# Altium footprint library WR-PHD_Socket Header_2.54mm.PcbLib: 187 footprints (part 12 of 12)
Each footprint in its own frame and in the unit in brackets; x right, y up, seen from the top. Pads: shape width x height; smd on the part's side, far side on the other; paste and mask are expansions set on the pad; w line width, h text height; cw(c..) or ccw(c..) is an arc to the next point about the centre after c.
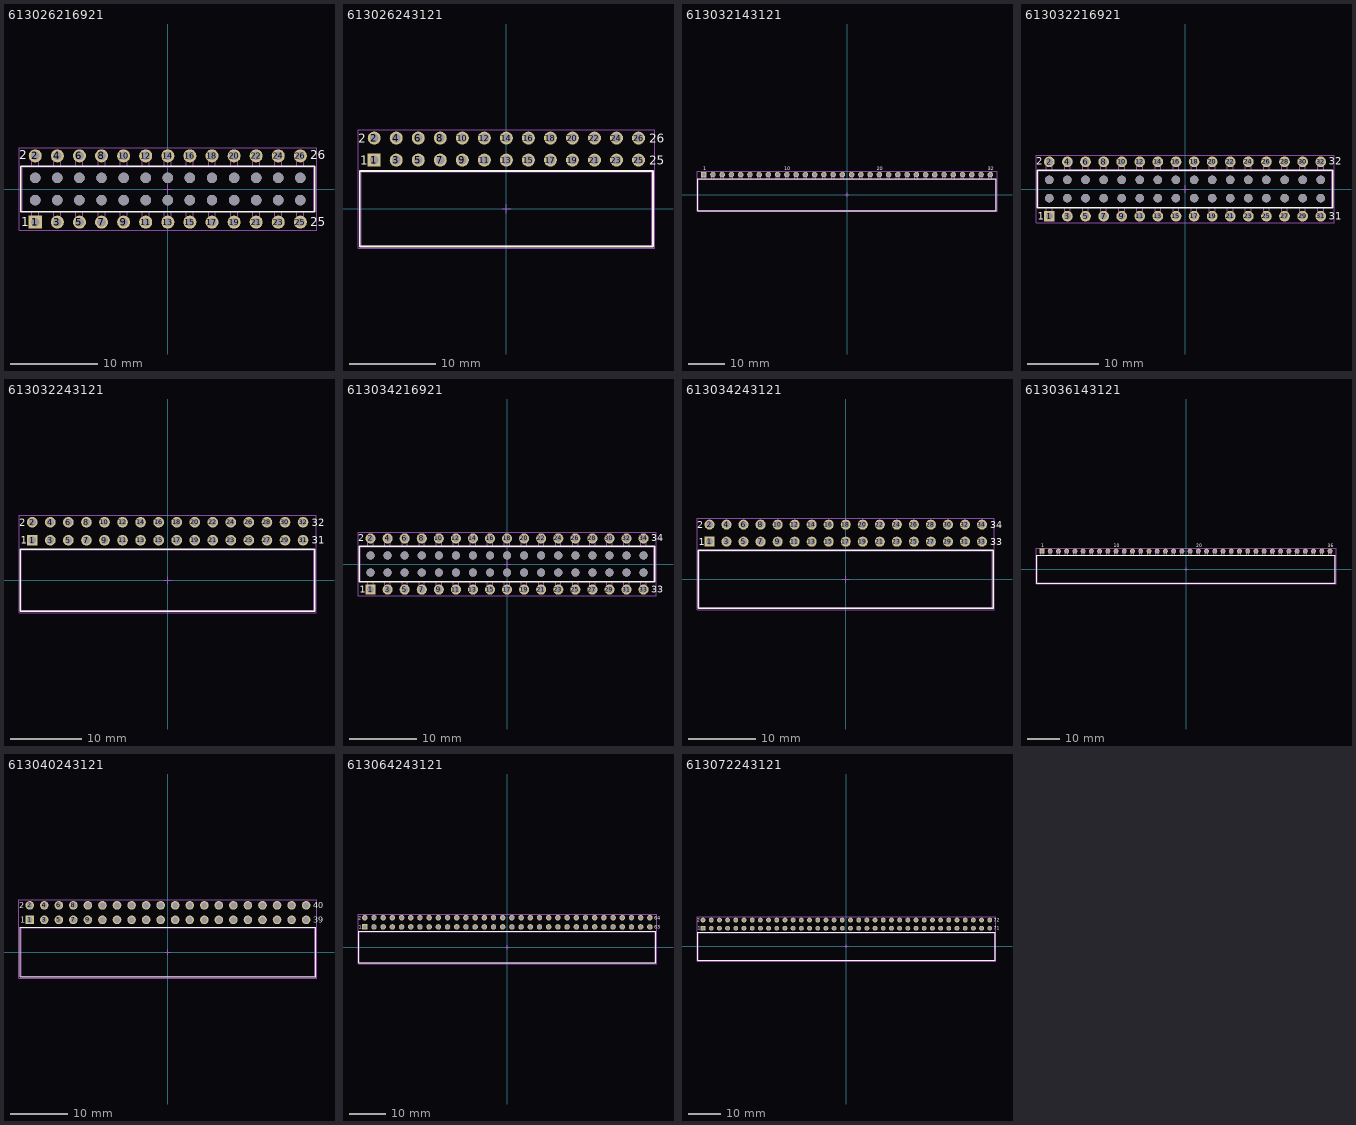
[diagram p11: the footprints below, top view; thin cyan lines are the x and y axes]

## 613026216921 [mm] "Socket Header, Pitch 2.54 mm, THT, Vertical, dual row, 26p"
height 5
pads (52):
  rect 1.5x1.5 hole 1: 1(-15.24,-3.81)
  round 1.5 hole 1: 2(-15.24,3.81) 3(-12.7,-3.81) 4(-12.7,3.81) 5(-10.16,-3.81) 6(-10.16,3.81) 7(-7.62,-3.81) 8(-7.62,3.81) 9(-5.08,-3.81) 10(-5.08,3.81) 11(-2.54,-3.81) 12(-2.54,3.81) 13(0,-3.81) 14(0,3.81) 15(2.54,-3.81) 16(2.54,3.81) 17(5.08,-3.81) 18(5.08,3.81) 19(7.62,-3.81) 20(7.62,3.81) 21(10.16,-3.81) 22(10.16,3.81) 23(12.7,-3.81) 24(12.7,3.81) 25(15.24,-3.81) 26(15.24,3.81)
  round 1.2 hole 1.2 unplated: MH1(-15.24,-1.27) MH2(-15.24,1.27) MH3(-12.7,-1.27) MH4(-12.7,1.27) MH5(-10.16,-1.27) MH6(-10.16,1.27) MH7(-7.62,-1.27) MH8(-7.62,1.27) MH9(-5.08,-1.27) MH10(-5.08,1.27) MH11(-2.54,-1.27) MH12(-2.54,1.27) MH13(0,-1.27) MH14(0,1.27) MH15(2.54,-1.27) MH16(2.54,1.27) MH17(5.08,-1.27) MH18(5.08,1.27) MH19(7.62,-1.27) MH20(7.62,1.27) MH21(10.16,-1.27) MH22(10.16,1.27) MH23(12.7,-1.27) MH24(12.7,1.27) MH25(15.24,-1.27) MH26(15.24,1.27)
Top Overlay:
  lines w0.2: -16.91,-2.615 16.91,-2.615 16.91,2.615 -16.91,2.615 -16.91,-2.615
  text "1" at -16.87,-4.3 h1.02
  text "2" at -17.07,3.4 h1.02
  text "25" at 16.37,-4.3 h1.02
  text "26" at 16.37,3.4 h1.02
Mechanical 13:
  lines w0.1: -15.64,-2.54 -15.64,-3.935 -14.84,-3.935 -14.84,-2.54 ; -15.64,2.54 -15.64,3.935 -14.84,3.935 -14.84,2.54 ; -13.1,-2.54 -13.1,-3.935 -12.3,-3.935 -12.3,-2.54 ; -13.1,2.54 -13.1,3.935 -12.3,3.935 -12.3,2.54 ; -10.56,-2.54 -10.56,-3.935 -9.76,-3.935 -9.76,-2.54 ; -10.56,2.54 -10.56,3.935 -9.76,3.935 -9.76,2.54 ; -8.02,-2.54 -8.02,-3.935 -7.22,-3.935 -7.22,-2.54 ; -8.02,2.54 -8.02,3.935 -7.22,3.935 -7.22,2.54 ; -5.48,-2.54 -5.48,-3.935 -4.68,-3.935 -4.68,-2.54 ; -5.48,2.54 -5.48,3.935 -4.68,3.935 -4.68,2.54 ; -2.94,-2.54 -2.94,-3.935 -2.14,-3.935 -2.14,-2.54 ; -2.94,2.54 -2.94,3.935 -2.14,3.935 -2.14,2.54 ; -0.4,-2.54 -0.4,-3.935 0.4,-3.935 0.4,-2.54 ; -0.4,2.54 -0.4,3.935 0.4,3.935 0.4,2.54 ; 2.14,-2.54 2.14,-3.935 2.94,-3.935 2.94,-2.54 ; 2.14,2.54 2.14,3.935 2.94,3.935 2.94,2.54 ; 4.68,-2.54 4.68,-3.935 5.48,-3.935 5.48,-2.54 ; 4.68,2.54 4.68,3.935 5.48,3.935 5.48,2.54 ; 7.22,-2.54 7.22,-3.935 8.02,-3.935 8.02,-2.54 ; 7.22,2.54 7.22,3.935 8.02,3.935 8.02,2.54 ; 9.76,-2.54 9.76,-3.935 10.56,-3.935 10.56,-2.54 ; 9.76,2.54 9.76,3.935 10.56,3.935 10.56,2.54 ; 12.3,-2.54 12.3,-3.935 13.1,-3.935 13.1,-2.54 ; 12.3,2.54 12.3,3.935 13.1,3.935 13.1,2.54 ; 14.84,-2.54 14.84,-3.935 15.64,-3.935 15.64,-2.54 ; 14.84,2.54 14.84,3.935 15.64,3.935 15.64,2.54 ; -16.76,-2.54 -16.76,2.54 16.76,2.54 16.76,-2.54 -16.76,-2.54
Mechanical 15:
  lines w0.05: -0.5,0 0.5,0 ; 0,-0.5 0,0.5 ; -17.11,-4.76 17.11,-4.76 17.11,4.76 -17.11,4.76 -17.11,-4.76
3D body "613026216921.stp": height 5.02, standoff -3.08, extent -16.76,-3.935 16.76,3.935

## 613026243121 [mm] "Socket Header, Pitch 2.54 mm, THT, Angled, dual row, 26p"
height 5.08
pads (26):
  rect 1.5x1.5 hole 1.02: 1(-15.24,5.61)
  round 1.5 hole 1.02: 2(-15.24,8.15) 3(-12.7,5.61) 4(-12.7,8.15) 5(-10.16,5.61) 6(-10.16,8.15) 7(-7.62,5.61) 8(-7.62,8.15) 9(-5.08,5.61) 10(-5.08,8.15) 11(-2.54,5.61) 12(-2.54,8.15) 13(0,5.61) 14(0,8.15) 15(2.54,5.61) 16(2.54,8.15) 17(5.08,5.61) 18(5.08,8.15) 19(7.62,5.61) 20(7.62,8.15) 21(10.16,5.61) 22(10.16,8.15) 23(12.7,5.61) 24(12.7,8.15) 25(15.24,5.61) 26(15.24,8.15)
Top Overlay:
  lines w0.2: -16.91,-4.35 -16.91,4.35 16.91,4.35 16.91,-4.35 -16.91,-4.35
  text "2" at -17.07,7.6 h1.02
  text "1" at -16.87,5.1 h1.02
  text "26" at 16.47,7.6 h1.02
  text "25" at 16.47,5.1 h1.02
Mechanical 13:
  lines w0.1: -16.76,-4.25 -16.76,4.25 16.76,4.25 16.76,-4.25 -16.76,-4.25
Mechanical 15:
  lines w0.05: -0.5,0 0.5,0 ; 0,-0.5 0,0.5 ; -17.11,-4.55 17.11,-4.55 17.11,9.1 -17.11,9.1 -17.11,-4.55
3D body "613026243121.stp": height 5.05, standoff -3.25, extent -16.76,-4.25 16.76,8.35

## 613032143121 [mm] "Socket Header, Pitch 2.54 mm, THT, Angled, single row, 32p"
height 2.5
pads (32):
  rect 1.52x1.52 hole 1.02: 1(-39.37,5.55)
  round 1.52 hole 1.02: 2(-36.83,5.55) 3(-34.29,5.55) 4(-31.75,5.55) 5(-29.21,5.55) 6(-26.67,5.55) 7(-24.13,5.55) 8(-21.59,5.55) 9(-19.05,5.55) 10(-16.51,5.55) 11(-13.97,5.55) 12(-11.43,5.55) 13(-8.89,5.55) 14(-6.35,5.55) 15(-3.81,5.55) 16(-1.27,5.55) 17(1.27,5.55) 18(3.81,5.55) 19(6.35,5.55) 20(8.89,5.55) 21(11.43,5.55) 22(13.97,5.55) 23(16.51,5.55) 24(19.05,5.55) 25(21.59,5.55) 26(24.13,5.55) 27(26.67,5.55) 28(29.21,5.55) 29(31.75,5.55) 30(34.29,5.55) 31(36.83,5.55) 32(39.37,5.55)
Top Overlay:
  lines w0.2: -41.015,-4.35 41.015,-4.35 41.015,4.35 -41.015,4.35 -41.015,-4.35
  text "32" at 38.69,6.7 h1.02
  text "10" at -17.19,6.7 h1.02
  text "1" at -39.53,6.7 h1.02
  text "20" at 8.21,6.7 h1.02
Mechanical 13:
  lines w0.1: -39.74,4.25 -39.74,5.75 -39,5.75 -39,4.25 ; -37.2,4.25 -37.2,5.75 -36.46,5.75 -36.46,4.25 ; -34.66,4.25 -34.66,5.75 -33.92,5.75 -33.92,4.25 ; -32.12,4.25 -32.12,5.75 -31.38,5.75 -31.38,4.25 ; -29.58,4.25 -29.58,5.75 -28.84,5.75 -28.84,4.25 ; -27.04,4.25 -27.04,5.75 -26.3,5.75 -26.3,4.25 ; -24.5,4.25 -24.5,5.75 -23.76,5.75 -23.76,4.25 ; -21.96,4.25 -21.96,5.75 -21.22,5.75 -21.22,4.25 ; -19.42,4.25 -19.42,5.75 -18.68,5.75 -18.68,4.25 ; -16.88,4.25 -16.88,5.75 -16.14,5.75 -16.14,4.25 ; -14.34,4.25 -14.34,5.75 -13.6,5.75 -13.6,4.25 ; -11.8,4.25 -11.8,5.75 -11.06,5.75 -11.06,4.25 ; -9.26,4.25 -9.26,5.75 -8.52,5.75 -8.52,4.25 ; -6.72,4.25 -6.72,5.75 -5.98,5.75 -5.98,4.25 ; -4.18,4.25 -4.18,5.75 -3.44,5.75 -3.44,4.25 ; -1.64,4.25 -1.64,5.75 -0.9,5.75 -0.9,4.25 ; 0.9,4.25 0.9,5.75 1.64,5.75 1.64,4.25 ; 3.44,4.25 3.44,5.75 4.18,5.75 4.18,4.25 ; 5.98,4.25 5.98,5.75 6.72,5.75 6.72,4.25 ; 8.52,4.25 8.52,5.75 9.26,5.75 9.26,4.25 ; 11.06,4.25 11.06,5.75 11.8,5.75 11.8,4.25 ; 13.6,4.25 13.6,5.75 14.34,5.75 14.34,4.25 ; 16.14,4.25 16.14,5.75 16.88,5.75 16.88,4.25 ; 18.68,4.25 18.68,5.75 19.42,5.75 19.42,4.25 ; 21.22,4.25 21.22,5.75 21.96,5.75 21.96,4.25 ; 23.76,4.25 23.76,5.75 24.5,5.75 24.5,4.25 ; 26.3,4.25 26.3,5.75 27.04,5.75 27.04,4.25 ; 28.84,4.25 28.84,5.75 29.58,5.75 29.58,4.25 ; 31.38,4.25 31.38,5.75 32.12,5.75 32.12,4.25 ; 33.92,4.25 33.92,5.75 34.66,5.75 34.66,4.25 ; 36.46,4.25 36.46,5.75 37.2,5.75 37.2,4.25 ; 39,4.25 39,5.75 39.74,5.75 39.74,4.25 ; -40.89,-4.25 40.89,-4.25 40.89,4.25 -40.89,4.25 -40.89,-4.25
Mechanical 15:
  lines w0.05: -0.5,0 0.5,0 ; 0,-0.5 0,0.5 ; -41.215,-4.55 -41.215,6.51 41.215,6.51 41.215,-4.55 -41.215,-4.55
3D body "613032143121.stp": height 2.55, standoff -3.04, extent -40.89,-4.25 40.89,5.75

## 613032216921 [mm] "Socket Header, Pitch 2.54 mm, THT, Vertical, dual row, 32p"
height 5
pads (64):
  rect 1.5x1.5 hole 1: 1(-19.05,-3.81)
  round 1.5 hole 1: 2(-19.05,3.81) 3(-16.51,-3.81) 4(-16.51,3.81) 5(-13.97,-3.81) 6(-13.97,3.81) 7(-11.43,-3.81) 8(-11.43,3.81) 9(-8.89,-3.81) 10(-8.89,3.81) 11(-6.35,-3.81) 12(-6.35,3.81) 13(-3.81,-3.81) 14(-3.81,3.81) 15(-1.27,-3.81) 16(-1.27,3.81) 17(1.27,-3.81) 18(1.27,3.81) 19(3.81,-3.81) 20(3.81,3.81) 21(6.35,-3.81) 22(6.35,3.81) 23(8.89,-3.81) 24(8.89,3.81) 25(11.43,-3.81) 26(11.43,3.81) 27(13.97,-3.81) 28(13.97,3.81) 29(16.51,-3.81) 30(16.51,3.81) 31(19.05,-3.81) 32(19.05,3.81)
  round 1.2 hole 1.2 unplated: MH1(-19.05,-1.27) MH2(-19.05,1.27) MH3(-16.51,-1.27) MH4(-16.51,1.27) MH5(-13.97,-1.27) MH6(-13.97,1.27) MH7(-11.43,-1.27) MH8(-11.43,1.27) MH9(-8.89,-1.27) MH10(-8.89,1.27) MH11(-6.35,-1.27) MH12(-6.35,1.27) MH13(-3.81,-1.27) MH14(-3.81,1.27) MH15(-1.27,-1.27) MH16(-1.27,1.27) MH17(1.27,-1.27) MH18(1.27,1.27) MH19(3.81,-1.27) MH20(3.81,1.27) MH21(6.35,-1.27) MH22(6.35,1.27) MH23(8.89,-1.27) MH24(8.89,1.27) MH25(11.43,-1.27) MH26(11.43,1.27) MH27(13.97,-1.27) MH28(13.97,1.27) MH29(16.51,-1.27) MH30(16.51,1.27) MH31(19.05,-1.27) MH32(19.05,1.27)
Top Overlay:
  lines w0.2: -20.72,-2.615 20.72,-2.615 20.72,2.615 -20.72,2.615 -20.72,-2.615
  text "32" at 20.18,3.4 h1.02
  text "31" at 20.18,-4.3 h1.02
  text "1" at -20.68,-4.3 h1.02
  text "2" at -20.88,3.4 h1.02
Mechanical 13:
  lines w0.1: -19.45,-2.54 -19.45,-3.935 -18.65,-3.935 -18.65,-2.54 ; -19.45,2.54 -19.45,3.935 -18.65,3.935 -18.65,2.54 ; -16.91,-2.54 -16.91,-3.935 -16.11,-3.935 -16.11,-2.54 ; -16.91,2.54 -16.91,3.935 -16.11,3.935 -16.11,2.54 ; -14.37,-2.54 -14.37,-3.935 -13.57,-3.935 -13.57,-2.54 ; -14.37,2.54 -14.37,3.935 -13.57,3.935 -13.57,2.54 ; -11.83,-2.54 -11.83,-3.935 -11.03,-3.935 -11.03,-2.54 ; -11.83,2.54 -11.83,3.935 -11.03,3.935 -11.03,2.54 ; -9.29,-2.54 -9.29,-3.935 -8.49,-3.935 -8.49,-2.54 ; -9.29,2.54 -9.29,3.935 -8.49,3.935 -8.49,2.54 ; -6.75,-2.54 -6.75,-3.935 -5.95,-3.935 -5.95,-2.54 ; -6.75,2.54 -6.75,3.935 -5.95,3.935 -5.95,2.54 ; -4.21,-2.54 -4.21,-3.935 -3.41,-3.935 -3.41,-2.54 ; -4.21,2.54 -4.21,3.935 -3.41,3.935 -3.41,2.54 ; -1.67,-2.54 -1.67,-3.935 -0.87,-3.935 -0.87,-2.54 ; -1.67,2.54 -1.67,3.935 -0.87,3.935 -0.87,2.54 ; 0.87,-2.54 0.87,-3.935 1.67,-3.935 1.67,-2.54 ; 0.87,2.54 0.87,3.935 1.67,3.935 1.67,2.54 ; 3.41,-2.54 3.41,-3.935 4.21,-3.935 4.21,-2.54 ; 3.41,2.54 3.41,3.935 4.21,3.935 4.21,2.54 ; 5.95,-2.54 5.95,-3.935 6.75,-3.935 6.75,-2.54 ; 5.95,2.54 5.95,3.935 6.75,3.935 6.75,2.54 ; 8.49,-2.54 8.49,-3.935 9.29,-3.935 9.29,-2.54 ; 8.49,2.54 8.49,3.935 9.29,3.935 9.29,2.54 ; 11.03,-2.54 11.03,-3.935 11.83,-3.935 11.83,-2.54 ; 11.03,2.54 11.03,3.935 11.83,3.935 11.83,2.54 ; 13.57,-2.54 13.57,-3.935 14.37,-3.935 14.37,-2.54 ; 13.57,2.54 13.57,3.935 14.37,3.935 14.37,2.54 ; 16.11,-2.54 16.11,-3.935 16.91,-3.935 16.91,-2.54 ; 16.11,2.54 16.11,3.935 16.91,3.935 16.91,2.54 ; 18.65,-2.54 18.65,-3.935 19.45,-3.935 19.45,-2.54 ; 18.65,2.54 18.65,3.935 19.45,3.935 19.45,2.54 ; -20.57,-2.54 -20.57,2.54 20.57,2.54 20.57,-2.54 -20.57,-2.54
Mechanical 15:
  lines w0.05: -0.5,0 0.5,0 ; 0,-0.5 0,0.5 ; -20.92,-4.76 20.92,-4.76 20.92,4.76 -20.92,4.76 -20.92,-4.76
3D body "613032216921.stp": height 5.02, standoff -3.08, extent -20.57,-3.935 20.57,3.935

## 613032243121 [mm] "Socket Header, Pitch 2.54 mm, THT, Angled, dual row, 32p"
height 5.08
pads (32):
  rect 1.5x1.5 hole 1.02: 1(-19.05,5.61)
  round 1.5 hole 1.02: 2(-19.05,8.15) 3(-16.51,5.61) 4(-16.51,8.15) 5(-13.97,5.61) 6(-13.97,8.15) 7(-11.43,5.61) 8(-11.43,8.15) 9(-8.89,5.61) 10(-8.89,8.15) 11(-6.35,5.61) 12(-6.35,8.15) 13(-3.81,5.61) 14(-3.81,8.15) 15(-1.27,5.61) 16(-1.27,8.15) 17(1.27,5.61) 18(1.27,8.15) 19(3.81,5.61) 20(3.81,8.15) 21(6.35,5.61) 22(6.35,8.15) 23(8.89,5.61) 24(8.89,8.15) 25(11.43,5.61) 26(11.43,8.15) 27(13.97,5.61) 28(13.97,8.15) 29(16.51,5.61) 30(16.51,8.15) 31(19.05,5.61) 32(19.05,8.15)
Top Overlay:
  lines w0.2: -20.72,-4.35 20.72,-4.35 20.72,4.35 -20.72,4.35 -20.72,-4.35
  text "1" at -20.68,5.1 h1.02
  text "2" at -20.88,7.6 h1.02
  text "32" at 20.28,7.6 h1.02
  text "31" at 20.28,5.1 h1.02
Mechanical 13:
  lines w0.1: -20.57,-4.25 20.57,-4.25 20.57,4.25 -20.57,4.25 -20.57,-4.25
Mechanical 15:
  lines w0.05: -0.5,0 0.5,0 ; 0,-0.5 0,0.5 ; -20.92,-4.55 -20.92,9.1 20.92,9.1 20.92,-4.55 -20.92,-4.55
3D body "613032243121.stp": height 5.05, standoff -3.25, extent -20.57,-4.25 20.57,8.35

## 613034216921 [mm] "Socket Header, Pitch 2.54 mm, THT, Vertical, dual row, 34p"
height 5
pads (68):
  rect 1.5x1.5 hole 1: 1(-20.32,-3.81)
  round 1.5 hole 1: 2(-20.32,3.81) 3(-17.78,-3.81) 4(-17.78,3.81) 5(-15.24,-3.81) 6(-15.24,3.81) 7(-12.7,-3.81) 8(-12.7,3.81) 9(-10.16,-3.81) 10(-10.16,3.81) 11(-7.62,-3.81) 12(-7.62,3.81) 13(-5.08,-3.81) 14(-5.08,3.81) 15(-2.54,-3.81) 16(-2.54,3.81) 17(0,-3.81) 18(0,3.81) 19(2.54,-3.81) 20(2.54,3.81) 21(5.08,-3.81) 22(5.08,3.81) 23(7.62,-3.81) 24(7.62,3.81) 25(10.16,-3.81) 26(10.16,3.81) 27(12.7,-3.81) 28(12.7,3.81) 29(15.24,-3.81) 30(15.24,3.81) 31(17.78,-3.81) 32(17.78,3.81) 33(20.32,-3.81) 34(20.32,3.81)
  round 1.2 hole 1.2 unplated: MH1(-20.32,-1.27) MH2(-20.32,1.27) MH3(-17.78,-1.27) MH4(-17.78,1.27) MH5(-15.24,-1.27) MH6(-15.24,1.27) MH7(-12.7,-1.27) MH8(-12.7,1.27) MH9(-10.16,-1.27) MH10(-10.16,1.27) MH11(-7.62,-1.27) MH12(-7.62,1.27) MH13(-5.08,-1.27) MH14(-5.08,1.27) MH15(-2.54,-1.27) MH16(-2.54,1.27) MH17(0,-1.27) MH18(0,1.27) MH19(2.54,-1.27) MH20(2.54,1.27) MH21(5.08,-1.27) MH22(5.08,1.27) MH23(7.62,-1.27) MH24(7.62,1.27) MH25(10.16,-1.27) MH26(10.16,1.27) MH27(12.7,-1.27) MH28(12.7,1.27) MH29(15.24,-1.27) MH30(15.24,1.27) MH31(17.78,-1.27) MH32(17.78,1.27) MH33(20.32,-1.27) MH34(20.32,1.27)
Top Overlay:
  lines w0.2: -21.99,-2.615 21.99,-2.615 21.99,2.615 -21.99,2.615 -21.99,-2.615
  text "1" at -21.95,-4.3 h1.02
  text "2" at -22.15,3.4 h1.02
  text "33" at 21.45,-4.3 h1.02
  text "34" at 21.45,3.4 h1.02
Mechanical 13:
  lines w0.1: -20.72,-2.54 -20.72,-3.935 -19.92,-3.935 -19.92,-2.54 ; -20.72,2.54 -20.72,3.935 -19.92,3.935 -19.92,2.54 ; -18.18,-2.54 -18.18,-3.935 -17.38,-3.935 -17.38,-2.54 ; -18.18,2.54 -18.18,3.935 -17.38,3.935 -17.38,2.54 ; -15.64,-2.54 -15.64,-3.935 -14.84,-3.935 -14.84,-2.54 ; -15.64,2.54 -15.64,3.935 -14.84,3.935 -14.84,2.54 ; -13.1,-2.54 -13.1,-3.935 -12.3,-3.935 -12.3,-2.54 ; -13.1,2.54 -13.1,3.935 -12.3,3.935 -12.3,2.54 ; -10.56,-2.54 -10.56,-3.935 -9.76,-3.935 -9.76,-2.54 ; -10.56,2.54 -10.56,3.935 -9.76,3.935 -9.76,2.54 ; -8.02,-2.54 -8.02,-3.935 -7.22,-3.935 -7.22,-2.54 ; -8.02,2.54 -8.02,3.935 -7.22,3.935 -7.22,2.54 ; -5.48,-2.54 -5.48,-3.935 -4.68,-3.935 -4.68,-2.54 ; -5.48,2.54 -5.48,3.935 -4.68,3.935 -4.68,2.54 ; -2.94,-2.54 -2.94,-3.935 -2.14,-3.935 -2.14,-2.54 ; -2.94,2.54 -2.94,3.935 -2.14,3.935 -2.14,2.54 ; -0.4,-2.54 -0.4,-3.935 0.4,-3.935 0.4,-2.54 ; -0.4,2.54 -0.4,3.935 0.4,3.935 0.4,2.54 ; 2.14,-2.54 2.14,-3.935 2.94,-3.935 2.94,-2.54 ; 2.14,2.54 2.14,3.935 2.94,3.935 2.94,2.54 ; 4.68,-2.54 4.68,-3.935 5.48,-3.935 5.48,-2.54 ; 4.68,2.54 4.68,3.935 5.48,3.935 5.48,2.54 ; 7.22,-2.54 7.22,-3.935 8.02,-3.935 8.02,-2.54 ; 7.22,2.54 7.22,3.935 8.02,3.935 8.02,2.54 ; 9.76,-2.54 9.76,-3.935 10.56,-3.935 10.56,-2.54 ; 9.76,2.54 9.76,3.935 10.56,3.935 10.56,2.54 ; 12.3,-2.54 12.3,-3.935 13.1,-3.935 13.1,-2.54 ; 12.3,2.54 12.3,3.935 13.1,3.935 13.1,2.54 ; 14.84,-2.54 14.84,-3.935 15.64,-3.935 15.64,-2.54 ; 14.84,2.54 14.84,3.935 15.64,3.935 15.64,2.54 ; 17.38,-2.54 17.38,-3.935 18.18,-3.935 18.18,-2.54 ; 17.38,2.54 17.38,3.935 18.18,3.935 18.18,2.54 ; 19.92,-2.54 19.92,-3.935 20.72,-3.935 20.72,-2.54 ; 19.92,2.54 19.92,3.935 20.72,3.935 20.72,2.54 ; -21.84,-2.54 -21.84,2.54 21.84,2.54 21.84,-2.54 -21.84,-2.54
Mechanical 15:
  lines w0.05: -0.5,0 0.5,0 ; 0,-0.5 0,0.5 ; -22.19,-4.76 22.19,-4.76 22.19,4.76 -22.19,4.76 -22.19,-4.76
3D body "613034216921.stp": height 5.02, standoff -3.08, extent -21.84,-3.935 21.84,3.935

## 613034243121 [mm] "Socket Header, Pitch 2.54 mm, THT, Angled, dual row, 34p"
height 5.08
pads (34):
  rect 1.5x1.5 hole 1.02: 1(-20.32,5.61)
  round 1.5 hole 1.02: 2(-20.32,8.15) 3(-17.78,5.61) 4(-17.78,8.15) 5(-15.24,5.61) 6(-15.24,8.15) 7(-12.7,5.61) 8(-12.7,8.15) 9(-10.16,5.61) 10(-10.16,8.15) 11(-7.62,5.61) 12(-7.62,8.15) 13(-5.08,5.61) 14(-5.08,8.15) 15(-2.54,5.61) 16(-2.54,8.15) 17(0,5.61) 18(0,8.15) 19(2.54,5.61) 20(2.54,8.15) 21(5.08,5.61) 22(5.08,8.15) 23(7.62,5.61) 24(7.62,8.15) 25(10.16,5.61) 26(10.16,8.15) 27(12.7,5.61) 28(12.7,8.15) 29(15.24,5.61) 30(15.24,8.15) 31(17.78,5.61) 32(17.78,8.15) 33(20.32,5.61) 34(20.32,8.15)
Top Overlay:
  lines w0.2: -21.99,-4.35 -21.99,4.35 21.99,4.35 21.99,-4.35 -21.99,-4.35
  text "2" at -22.15,7.6 h1.02
  text "1" at -21.95,5.1 h1.02
  text "34" at 21.55,7.6 h1.02
  text "33" at 21.55,5.1 h1.02
Mechanical 13:
  lines w0.1: -21.84,-4.25 -21.84,4.25 21.84,4.25 21.84,-4.25 -21.84,-4.25
Mechanical 15:
  lines w0.05: -0.5,0 0.5,0 ; 0,-0.5 0,0.5 ; -22.19,-4.55 22.19,-4.55 22.19,9.1 -22.19,9.1 -22.19,-4.55
3D body "613034243121.stp": height 5.05, standoff -3.25, extent -21.84,-4.25 21.84,8.35

## 613036143121 [mm] "Socket Header, Pitch 2.54 mm, THT, Angled, single row, 36p"
height 2.5
pads (36):
  rect 1.52x1.52 hole 1.02: 1(-44.45,5.55)
  round 1.52 hole 1.02: 2(-41.91,5.55) 3(-39.37,5.55) 4(-36.83,5.55) 5(-34.29,5.55) 6(-31.75,5.55) 7(-29.21,5.55) 8(-26.67,5.55) 9(-24.13,5.55) 10(-21.59,5.55) 11(-19.05,5.55) 12(-16.51,5.55) 13(-13.97,5.55) 14(-11.43,5.55) 15(-8.89,5.55) 16(-6.35,5.55) 17(-3.81,5.55) 18(-1.27,5.55) 19(1.27,5.55) 20(3.81,5.55) 21(6.35,5.55) 22(8.89,5.55) 23(11.43,5.55) 24(13.97,5.55) 25(16.51,5.55) 26(19.05,5.55) 27(21.59,5.55) 28(24.13,5.55) 29(26.67,5.55) 30(29.21,5.55) 31(31.75,5.55) 32(34.29,5.55) 33(36.83,5.55) 34(39.37,5.55) 35(41.91,5.55) 36(44.45,5.55)
Top Overlay:
  lines w0.2: -46.095,-4.35 -46.095,4.35 46.095,4.35 46.095,-4.35 -46.095,-4.35
  text "20" at 3.13,6.7 h1.02
  text "1" at -44.61,6.7 h1.02
  text "10" at -22.27,6.7 h1.02
  text "36" at 43.77,6.7 h1.02
Mechanical 13:
  lines w0.1: -44.82,4.25 -44.82,5.75 -44.08,5.75 -44.08,4.25 ; -42.28,4.25 -42.28,5.75 -41.54,5.75 -41.54,4.25 ; -39.74,4.25 -39.74,5.75 -39,5.75 -39,4.25 ; -37.2,4.25 -37.2,5.75 -36.46,5.75 -36.46,4.25 ; -34.66,4.25 -34.66,5.75 -33.92,5.75 -33.92,4.25 ; -32.12,4.25 -32.12,5.75 -31.38,5.75 -31.38,4.25 ; -29.58,4.25 -29.58,5.75 -28.84,5.75 -28.84,4.25 ; -27.04,4.25 -27.04,5.75 -26.3,5.75 -26.3,4.25 ; -24.5,4.25 -24.5,5.75 -23.76,5.75 -23.76,4.25 ; -21.96,4.25 -21.96,5.75 -21.22,5.75 -21.22,4.25 ; -19.42,4.25 -19.42,5.75 -18.68,5.75 -18.68,4.25 ; -16.88,4.25 -16.88,5.75 -16.14,5.75 -16.14,4.25 ; -14.34,4.25 -14.34,5.75 -13.6,5.75 -13.6,4.25 ; -11.8,4.25 -11.8,5.75 -11.06,5.75 -11.06,4.25 ; -9.26,4.25 -9.26,5.75 -8.52,5.75 -8.52,4.25 ; -6.72,4.25 -6.72,5.75 -5.98,5.75 -5.98,4.25 ; -4.18,4.25 -4.18,5.75 -3.44,5.75 -3.44,4.25 ; -1.64,4.25 -1.64,5.75 -0.9,5.75 -0.9,4.25 ; 0.9,4.25 0.9,5.75 1.64,5.75 1.64,4.25 ; 3.44,4.25 3.44,5.75 4.18,5.75 4.18,4.25 ; 5.98,4.25 5.98,5.75 6.72,5.75 6.72,4.25 ; 8.52,4.25 8.52,5.75 9.26,5.75 9.26,4.25 ; 11.06,4.25 11.06,5.75 11.8,5.75 11.8,4.25 ; 13.6,4.25 13.6,5.75 14.34,5.75 14.34,4.25 ; 16.14,4.25 16.14,5.75 16.88,5.75 16.88,4.25 ; 18.68,4.25 18.68,5.75 19.42,5.75 19.42,4.25 ; 21.22,4.25 21.22,5.75 21.96,5.75 21.96,4.25 ; 23.76,4.25 23.76,5.75 24.5,5.75 24.5,4.25 ; 26.3,4.25 26.3,5.75 27.04,5.75 27.04,4.25 ; 28.84,4.25 28.84,5.75 29.58,5.75 29.58,4.25 ; 31.38,4.25 31.38,5.75 32.12,5.75 32.12,4.25 ; 33.92,4.25 33.92,5.75 34.66,5.75 34.66,4.25 ; 36.46,4.25 36.46,5.75 37.2,5.75 37.2,4.25 ; 39,4.25 39,5.75 39.74,5.75 39.74,4.25 ; 41.54,4.25 41.54,5.75 42.28,5.75 42.28,4.25 ; 44.08,4.25 44.08,5.75 44.82,5.75 44.82,4.25 ; -45.97,-4.25 -45.97,4.25 45.97,4.25 45.97,-4.25 -45.97,-4.25
Mechanical 15:
  lines w0.05: -0.5,0 0.5,0 ; 0,-0.5 0,0.5 ; -46.295,-4.55 46.295,-4.55 46.295,6.51 -46.295,6.51 -46.295,-4.55
3D body "613036143121.stp": height 2.55, standoff -3.04, extent -45.97,-4.25 45.97,5.75

## 613040243121 [mm] "Socket Header, Pitch 2.54 mm, THT, Angled, dual row, 40p"
height 5.08
pads (40):
  rect 1.5x1.5 hole 1.02: 1(-24.13,5.61)
  round 1.5 hole 1.02: 2(-24.13,8.15) 3(-21.59,5.61) 4(-21.59,8.15) 5(-19.05,5.61) 6(-19.05,8.15) 7(-16.51,5.61) 8(-16.51,8.15) 9(-13.97,5.61) 10(-13.97,8.15) 11(-11.43,5.61) 12(-11.43,8.15) 13(-8.89,5.61) 14(-8.89,8.15) 15(-6.35,5.61) 16(-6.35,8.15) 17(-3.81,5.61) 18(-3.81,8.15) 19(-1.27,5.61) 20(-1.27,8.15) 21(1.27,5.61) 22(1.27,8.15) 23(3.81,5.61) 24(3.81,8.15) 25(6.35,5.61) 26(6.35,8.15) 27(8.89,5.61) 28(8.89,8.15) 29(11.43,5.61) 30(11.43,8.15) 31(13.97,5.61) 32(13.97,8.15) 33(16.51,5.61) 34(16.51,8.15) 35(19.05,5.61) 36(19.05,8.15) 37(21.59,5.61) 38(21.59,8.15) 39(24.13,5.61) 40(24.13,8.15)
Top Overlay:
  lines w0.2: -25.8,-4.35 -25.8,4.35 25.8,4.35 25.8,-4.35 -25.8,-4.35
  text "2" at -25.96,7.6 h1.02
  text "1" at -25.76,5.1 h1.02
  text "40" at 25.36,7.6 h1.02
  text "39" at 25.36,5.1 h1.02
Mechanical 13:
  lines w0.1: -25.65,-4.25 -25.65,4.25 25.65,4.25 25.65,-4.25 -25.65,-4.25
Mechanical 15:
  lines w0.05: -0.5,0 0.5,0 ; 0,-0.5 0,0.5 ; -26,-4.55 26,-4.55 26,9.1 -26,9.1 -26,-4.55
3D body "613040243121.stp": height 5.05, standoff -3.25, extent -25.65,-4.25 25.65,8.35

## 613064243121 [mm] "Socket Header, Pitch 2.54 mm, THT, Angled, dual row, 64p"
height 5.08
pads (64):
  rect 1.5x1.5 hole 1.02: 1(-39.37,5.61)
  round 1.5 hole 1.02: 2(-39.37,8.15) 3(-36.83,5.61) 4(-36.83,8.15) 5(-34.29,5.61) 6(-34.29,8.15) 7(-31.75,5.61) 8(-31.75,8.15) 9(-29.21,5.61) 10(-29.21,8.15) 11(-26.67,5.61) 12(-26.67,8.15) 13(-24.13,5.61) 14(-24.13,8.15) 15(-21.59,5.61) 16(-21.59,8.15) 17(-19.05,5.61) 18(-19.05,8.15) 19(-16.51,5.61) 20(-16.51,8.15) 21(-13.97,5.61) 22(-13.97,8.15) 23(-11.43,5.61) 24(-11.43,8.15) 25(-8.89,5.61) 26(-8.89,8.15) 27(-6.35,5.61) 28(-6.35,8.15) 29(-3.81,5.61) 30(-3.81,8.15) 31(-1.27,5.61) 32(-1.27,8.15) 33(1.27,5.61) 34(1.27,8.15) 35(3.81,5.61) 36(3.81,8.15) 37(6.35,5.61) 38(6.35,8.15) 39(8.89,5.61) 40(8.89,8.15) 41(11.43,5.61) 42(11.43,8.15) 43(13.97,5.61) 44(13.97,8.15) 45(16.51,5.61) 46(16.51,8.15) 47(19.05,5.61) 48(19.05,8.15) 49(21.59,5.61) 50(21.59,8.15) 51(24.13,5.61) 52(24.13,8.15) 53(26.67,5.61) 54(26.67,8.15) 55(29.21,5.61) 56(29.21,8.15) 57(31.75,5.61) 58(31.75,8.15) 59(34.29,5.61) 60(34.29,8.15) 61(36.83,5.61) 62(36.83,8.15) 63(39.37,5.61) 64(39.37,8.15)
Top Overlay:
  lines w0.2: -41.04,-4.35 -41.04,4.35 41.04,4.35 41.04,-4.35 -41.04,-4.35
  text "2" at -41.2,7.6 h1.02
  text "1" at -41,5.1 h1.02
  text "64" at 40.6,7.6 h1.02
  text "63" at 40.6,5.1 h1.02
Mechanical 13:
  lines w0.1: -40.89,-4.25 -40.89,4.25 40.89,4.25 40.89,-4.25 -40.89,-4.25
Mechanical 15:
  lines w0.05: -0.5,0 0.5,0 ; 0,-0.5 0,0.5 ; -41.24,-4.55 41.24,-4.55 41.24,9.1 -41.24,9.1 -41.24,-4.55
3D body "613064243121.stp": height 5.05, standoff -3.25, extent -40.89,-4.25 40.89,8.35

## 613072243121 [mm] "Socket Header, Pitch 2.54 mm, THT, Angled, dual row, 72p"
height 5.08
pads (72):
  rect 1.5x1.5 hole 1.02: 1(-44.45,5.61)
  round 1.5 hole 1.02: 2(-44.45,8.15) 3(-41.91,5.61) 4(-41.91,8.15) 5(-39.37,5.61) 6(-39.37,8.15) 7(-36.83,5.61) 8(-36.83,8.15) 9(-34.29,5.61) 10(-34.29,8.15) 11(-31.75,5.61) 12(-31.75,8.15) 13(-29.21,5.61) 14(-29.21,8.15) 15(-26.67,5.61) 16(-26.67,8.15) 17(-24.13,5.61) 18(-24.13,8.15) 19(-21.59,5.61) 20(-21.59,8.15) 21(-19.05,5.61) 22(-19.05,8.15) 23(-16.51,5.61) 24(-16.51,8.15) 25(-13.97,5.61) 26(-13.97,8.15) 27(-11.43,5.61) 28(-11.43,8.15) 29(-8.89,5.61) 30(-8.89,8.15) 31(-6.35,5.61) 32(-6.35,8.15) 33(-3.81,5.61) 34(-3.81,8.15) 35(-1.27,5.61) 36(-1.27,8.15) 37(1.27,5.61) 38(1.27,8.15) 39(3.81,5.61) 40(3.81,8.15) 41(6.35,5.61) 42(6.35,8.15) 43(8.89,5.61) 44(8.89,8.15) 45(11.43,5.61) 46(11.43,8.15) 47(13.97,5.61) 48(13.97,8.15) 49(16.51,5.61) 50(16.51,8.15) 51(19.05,5.61) 52(19.05,8.15) 53(21.59,5.61) 54(21.59,8.15) 55(24.13,5.61) 56(24.13,8.15) 57(26.67,5.61) 58(26.67,8.15) 59(29.21,5.61) 60(29.21,8.15) 61(31.75,5.61) 62(31.75,8.15) 63(34.29,5.61) 64(34.29,8.15) 65(36.83,5.61) 66(36.83,8.15) 67(39.37,5.61) 68(39.37,8.15) 69(41.91,5.61) 70(41.91,8.15) 71(44.45,5.61) 72(44.45,8.15)
Top Overlay:
  lines w0.2: -46.12,-4.35 -46.12,4.35 46.12,4.35 46.12,-4.35 -46.12,-4.35
  text "2" at -46.28,7.6 h1.02
  text "1" at -46.08,5.1 h1.02
  text "72" at 45.68,7.6 h1.02
  text "71" at 45.68,5.1 h1.02
Mechanical 13:
  lines w0.1: -45.97,-4.25 -45.97,4.25 45.97,4.25 45.97,-4.25 -45.97,-4.25
Mechanical 15:
  lines w0.05: -0.5,0 0.5,0 ; 0,-0.5 0,0.5 ; -46.32,-4.55 46.32,-4.55 46.32,9.1 -46.32,9.1 -46.32,-4.55
3D body "613072243121.stp": height 5.05, standoff -3.25, extent -45.97,-4.25 45.97,8.35